# Altium schematic symbol library ABM8-272-T3.SchLib: 1 symbol
Pins are listed as number, name and electrical type; pins without a type are passive.

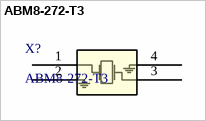
[diagram p0: symbol ABM8-272-T3]

## ABM8-272-T3
designator X?
Description; Manufacturer_Name: Abracon; Type: Crystals; Copyright: Copyright (C) 2026 Ultra Librarian. All rights reserved.; Manufacturer_Part_Number: ABM8-272-T3; RefDes: RefDes
footprint ABM8-272-T3_ABR
pins: 1, 2, 3, 4